# Altium schematic symbol library CGM.SCHLIB: 13 symbols
Pins are listed as number, name and electrical type; pins without a type are passive.

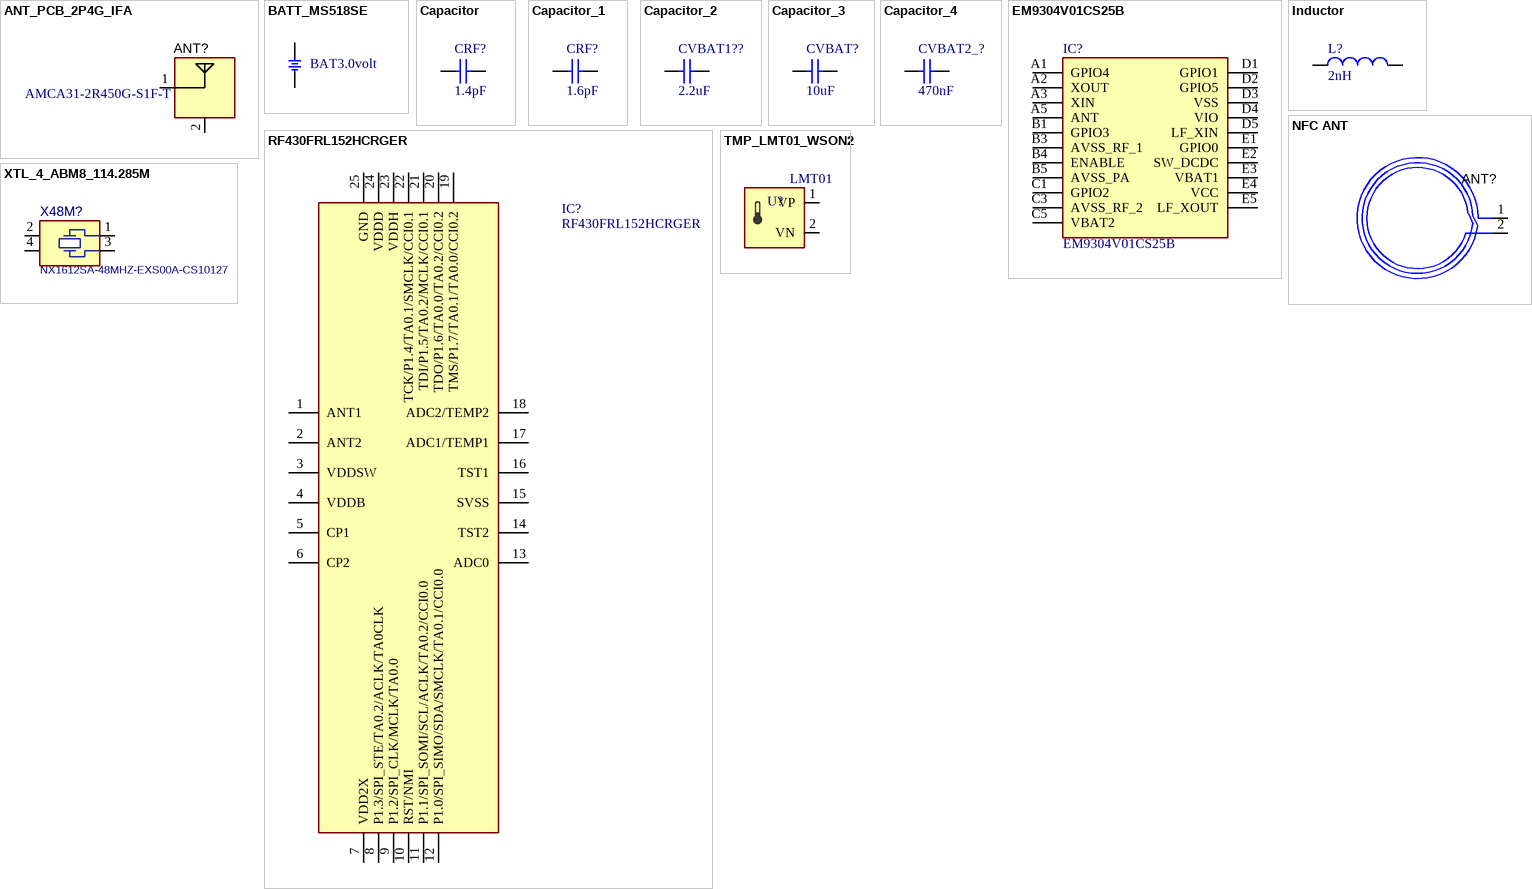
[diagram p0: symbols ANT_PCB_2P4G_IFA to XTL_4_ABM8_114.285M]

## ANT_PCB_2P4G_IFA
designator ANT?, comment AMCA31-2R450G-S1F-T  (net tie, no BOM)
Antenna,Microstrip, 2.4GHz; MANF: MANF; MANF_P#: MANF_P#; VALUE: AMCA31-2R450G-S1F-T
footprint ANTC3216X140N
pins: 1 FEEDER, 2 RETURN

## BATT_MS518SE
designator BT??, comment BAT3.0volt
BATTERY, Lithium, Rechargeable, 6.8mm; MANF_P#: MS518SE; MANF: SEIKO; PARAM: 3.4mAH, 10uA charge/discharge; PARAM2: 3V, -20~60°C; .: http://www.chila.ir; VALUE: BAT3.0volt
footprint BTH (BUTTON CELL BATTERY RETAINER 2994)
pins: 1, 2

## Capacitor
designator CRF?  value 1.4pF  (hidden comment: Capacitor)
SimulationGenericComponent: True
simulation model C_Capacitor_Default (CAP)
pins: 1, 2

## Capacitor_1
designator CRF?, comment value 1.6pF  (hidden comment: Capacitor)
SimulationGenericComponent: True
simulation model C_Capacitor_Default (CAP)
pins: 1, 2

## Capacitor_2
designator CVBAT1??, comment value 2.2uF  (hidden comment: Capacitor)
SimulationGenericComponent: True
simulation model C_Capacitor_Default (CAP)
pins: 1, 2

## Capacitor_3
designator CVBAT?, comment value 10uF  (hidden comment: Capacitor)
SimulationGenericComponent: True
simulation model C_Capacitor_Default (CAP)
pins: 1, 2

## Capacitor_4
designator CVBAT2_?, comment value 470nF  (hidden comment: Capacitor)
SimulationGenericComponent: True
simulation model C_Capacitor_Default (CAP)
pins: 1, 2

## EM9304V01CS25B
designator IC?
Integrated Circuit; Manufacturer_Name: EM MICROELECTRONIC; Height: 0mm; Manufacturer_Part_Number: EM9304V01CS25B
footprint EM9304V01CS25B
pins: A1 GPIO4, A2 XOUT, A3 XIN, A5 ANT, B1 GPIO3, B3 AVSS_RF_1, B4 ENABLE, B5 AVSS_PA, C1 GPIO2, C3 AVSS_RF_2, C5 VBAT2, D1 GPIO1, D2 GPIO5, D3 VSS, D4 VIO, D5 LF_XIN, E1 GPIO0, E2 SW_DCDC, E3 VBAT1, E4 VCC, E5 LF_XOUT

## Inductor
designator L?  value 2nH  (hidden comment: Inductor)
SimulationGenericComponent: True
simulation model L_Inductor_Default (INDUCTOR)
pins: 1, 2

## NFC ANT
designator ANT?  (net tie, no BOM)
MANF: MANF; MANF_P#: MANF_P#
footprint ANTC3216X140N
pins: 1 FEEDER, 2 RETURN

## RF430FRL152HCRGER
designator IC?
Integrated Circuit; Manufacturer_Name: Texas Instruments; Datasheet Link: http://www.ti.com/lit/gpn/rf430frl152h; Height: 1mm; Manufacturer_Part_Number: RF430FRL152HCRGER; Mouser Part Number: 595-R430FRL152HCRGER; Mouser Price/Stock: https://www.mouser.co.uk/ProductDetail/Texas-Instruments/RF430FRL152HCRGER?qs=bjKSiFBd6qkz5B9inwiJTw%3D%3D; Arrow Part Number: RF430FRL152HCRGER; Arrow Price/Stock: https://www.arrow.com/en/products/rf430frl152hcrger/texas-instruments?region=nac
footprint QFN50P400X400X100-25N-D
pins: 1 ANT1, 2 ANT2, 3 VDDSW, 4 VDDB, 5 CP1, 6 CP2, 7 VDD2X, 8 P1.3/SPI_STE/TA0.2/ACLK/TA0CLK, 9 P1.2/SPI_CLK/MCLK/TA0.0, 10 RST/NMI, 11 P1.1/SPI_SOMI/SCL/ACLK/TA0.2/CCI0.0, 12 P1.0/SPI_SIMO/SDA/SMCLK/TA0.1/CCI0.0, 13 ADC0, 14 TST2, 15 SVSS, 16 TST1, 17 ADC1/TEMP1, 18 ADC2/TEMP2, 19 TMS/P1.7/TA0.1/TA0.0/CCI0.2, 20 TDO/P1.6/TA0.0/TA0.2/CCI0.2, 21 TDI/P1.5/TA0.2/MCLK/CCI0.1, 22 TCK/P1.4/TA0.1/SMCLK/CCI0.1, 23 VDDH, 24 VDDD, 25 GND

## TMP_LMT01_WSON2
designator U?, comment LMT01
SENSOR, TEMP, DIGITAK, -50~150oC, VCC3~5.5v, Pulse interface; MANF_P#: LMT01LPG; MANF: Texas Instruments; PARAM2: PARAM2; VALUE: LMT01
footprint D_WSON2517 (WSON, DQX 2.5X1.7mm)
pins: 1 VP, 2 VN

## XTL_4_ABM8_114.285M
designator X48M?, comment NX1612SA-48MHZ-EXS00A-CS10127
CRYSTAL 114.285 MHZ 18PF SMD; MANF: ABRACON; DESC: DESCRIPTION; DIST#: MOUSER; PARAM2: PARAM; PARAM: 20PPM; MANF_P#: ABM8-166-114.285MHZ-T; ASSEMBLY: ASSEMBLY; PRICE: PRICE; VALUE: NX1612SA-48MHZ-EXS00A-CS10127
footprint NX1612SA48MHZEXS00ACS10127
pins: 1, 2, 3 2, 4